# Altium schematic symbol library Switches.SchLib: 1 symbol
Pins are listed as number, name and electrical type; pins without a type are passive.

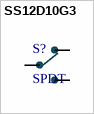
[diagram p0: symbol SS12D10G3]

## SS12D10G3
designator S?, comment SPDT
Switch,Slide,Sealed,SPDT,ON-NONE-ON; MF: C&K; MP: 1101M2S3CQE2; SnapEDA_Link: https://www.snapeda.com/parts/1101M2S3CQE2/C%2526K/view-part/?ref=snap; Package: None; Value: *; Check_prices: https://www.snapeda.com/parts/1101M2S3CQE2/C%2526K/view-part/?ref=eda
footprint SPDT (SS12D10G3)
pins: 1, 2, 3